# Altium footprint library Connectors.PcbLib: 228 footprints (part 3 of 15)
Each footprint in its own frame and in the unit in brackets; x right, y up, seen from the top. Pads: shape width x height; smd on the part's side, far side on the other; paste and mask are expansions set on the pad; w line width, h text height; cw(c..) or ccw(c..) is an arc to the next point about the centre after c.
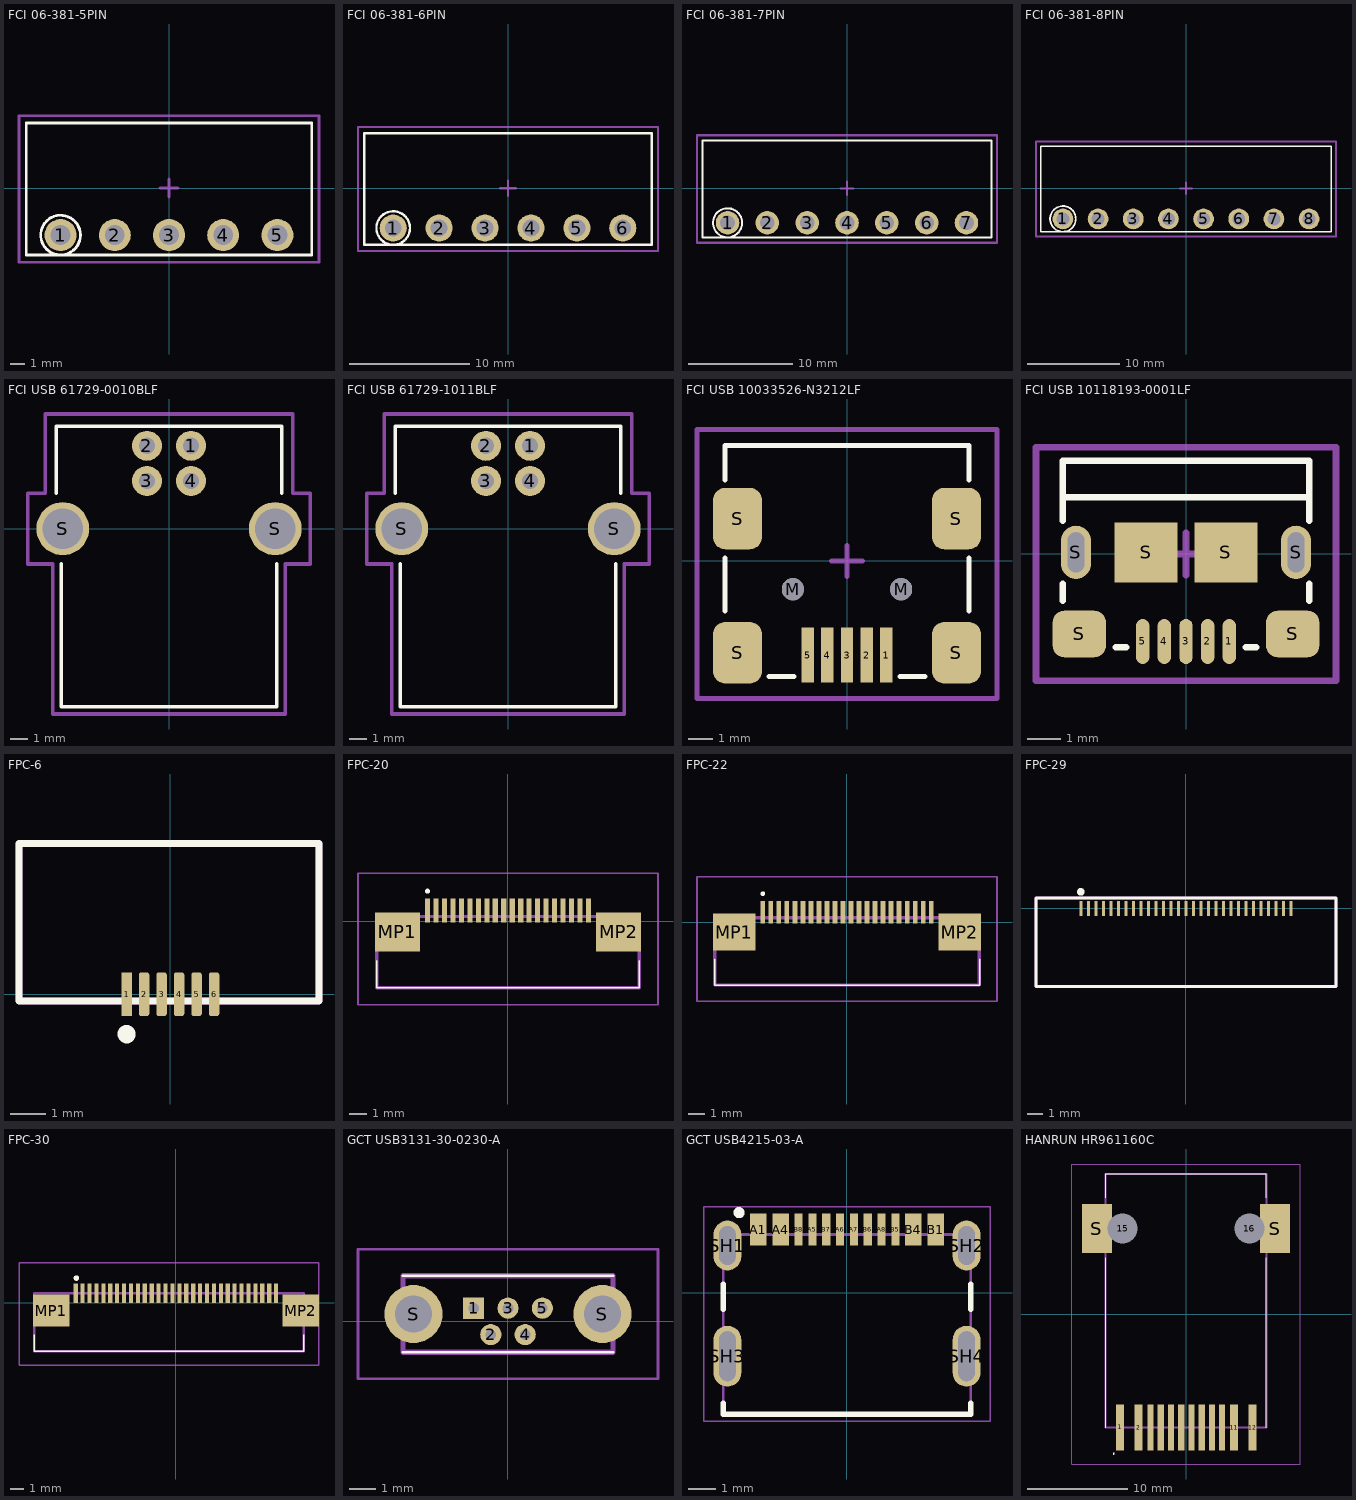
[diagram p2: the footprints below, top view; thin cyan lines are the x and y axes]

## FCI 06-381-5PIN [mm] "FCI Pluggable Terminal Block"
height 7
pads (5):
  round 2.25 hole 1.4: 1(-7.62,-3.302) 2(-3.81,-3.302) 3(0,-3.302) 4(3.81,-3.302) 5(7.62,-3.302)
Top Overlay:
  circle w0.2: c-7.62,-3.302 r1.393
  lines w0.2: -10.033,-4.699 10.033,-4.699 10.033,4.572 -10.033,4.572 -10.033,-4.699
Top Courtyard:
  lines w0.2: -0.635,0 0.635,0 ; 0,-0.635 0,0.635 ; -10.541,-5.207 10.541,-5.207 10.541,5.08 -10.541,5.08 -10.541,-5.207
3D body "FCI 06-381 5Pos.STEP": height 7.6, standoff -3.52, extent -10.12,-4.699 10.12,4.501

## FCI 06-381-6PIN [mm] "FCI Pluggable Terminal Block"
height 7
pads (6):
  round 2.25 hole 1.4: 1(-9.525,-3.302) 2(-5.715,-3.302) 3(-1.905,-3.302) 4(1.905,-3.302) 5(5.715,-3.302) 6(9.525,-3.302)
Top Overlay:
  circle w0.2: c-9.525,-3.302 r1.393
  lines w0.2: -11.938,-4.699 -11.938,4.572 11.938,4.572 11.938,-4.699 -11.938,-4.699
Top Courtyard:
  lines w0.2: -0.635,0 0.635,0 ; 0,-0.635 0,0.635 ; -12.446,-5.207 -12.446,5.08 12.446,5.08 12.446,-5.207 -12.446,-5.207
3D body "FCI 06-381 6Pos.STEP": height 7.6, standoff -3.52, extent -12.025,-4.699 12.025,4.501

## FCI 06-381-7PIN [mm] "FCI Pluggable Terminal Block"
height 7
pads (7):
  round 2.25 hole 1.4: 1(-11.43,-3.302) 2(-7.62,-3.302) 3(-3.81,-3.302) 4(0,-3.302) 5(3.81,-3.302) 6(7.62,-3.302) 7(11.43,-3.302)
Top Overlay:
  circle w0.2: c-11.43,-3.302 r1.393
  lines w0.2: -13.843,-4.699 13.843,-4.699 13.843,4.572 -13.843,4.572 -13.843,-4.699
Top Courtyard:
  lines w0.2: -0.635,0 0.635,0 ; 0,-0.635 0,0.635 ; -14.351,-5.207 14.351,-5.207 14.351,5.08 -14.351,5.08 -14.351,-5.207
3D body "FCI 06-381 7Pos.STEP": height 7.6, standoff -3.52, extent -13.93,-4.699 13.93,4.501

## FCI 06-381-8PIN [mm] "FCI Pluggable Terminal Block"
height 7
pads (8):
  round 2.25 hole 1.4: 1(-13.335,-3.302) 2(-9.525,-3.302) 3(-5.715,-3.302) 4(-1.905,-3.302) 5(1.905,-3.302) 6(5.715,-3.302) 7(9.525,-3.302) 8(13.335,-3.302)
Top Overlay:
  circle w0.2: c-13.335,-3.302 r1.393
  lines w0.2: -15.748,-4.699 -15.748,4.572 15.748,4.572 15.748,-4.699 -15.748,-4.699
Top Courtyard:
  lines w0.2: -0.635,0 0.635,0 ; 0,-0.635 0,0.635 ; -16.256,-5.207 -16.256,5.08 16.256,5.08 16.256,-5.207 -16.256,-5.207
3D body "FCI 06-381 8Pos.STEP": height 7.6, standoff -3.52, extent -15.835,-4.699 15.835,4.501

## FCI USB 61729-0010BLF [mm]
height 11
pads (6):
  round 1.7 hole 0.92: 1(1.25,4.7) 2(-1.25,4.7) 3(-1.25,2.71) 4(1.25,2.71)
  round 3 hole 2.3: S(-6.02,0) S(6.02,0)
Top Overlay:
  lines w0.2: -6.4,2 -6.4,5.8 6.4,5.8 6.4,2 ; -6.1,-2 -6.1,-10.1 6.1,-10.1 6.1,-2
Top Courtyard:
  lines w0.2: -8,-2 -8,2 -7,2 -7,6.5 0,6.5 7,6.5 7,2 8,2 8,-2 6.6,-2 6.6,-10.5 0,-10.5 -6.6,-10.5 -6.6,-2 -8,-2
3D body "FCI 61729-0010BLF.STEP": height 11, standoff -2.8, extent -6.56,-10.175 6.56,5.765

## FCI USB 61729-1011BLF [mm]
height 11
pads (6):
  round 1.7 hole 0.92: 1(1.25,4.7) 2(-1.25,4.7) 3(-1.25,2.71) 4(1.25,2.71)
  round 3 hole 2.3: S(-6.02,0) S(6.02,0)
Top Overlay:
  lines w0.2: -6.4,2 -6.4,5.8 6.4,5.8 6.4,2 ; -6.1,-2 -6.1,-10.1 6.1,-10.1 6.1,-2
Top Courtyard:
  lines w0.2: -8,-2 -6.6,-2 -6.6,-10.5 0,-10.5 6.6,-10.5 6.6,-2 8,-2 8,2 7,2 7,6.5 0,6.5 -7,6.5 -7,2 -8,2 -8,-2
3D body "FCI 61729-1011BLF.STEP": height 11, standoff -2.8, extent -6.56,-10.175 6.56,5.765

## FCI USB 10033526-N3212LF [mm] "USB 2.0 Type B Mini"
height 3.95
pads (11):
  rect 0.5x2.25 smd: 1(1.6,-3.826) 2(0.8,-3.826) 3(0,-3.826) 4(-0.8,-3.826) 5(-1.6,-3.826)
  round 0.9 hole 0.9 unplated: M(-2.2,-1.151) M(2.2,-1.151)
  rrect50% 2x2.5 smd: S(-4.45,-3.731) S(-4.45,1.719) S(4.45,-3.731) S(4.45,1.719)
Top Overlay:
  lines w0.2: -4.953,-2.04 -4.953,0.119 ; -4.953,3.294 -4.953,4.691 4.953,4.691 4.953,3.294 ; -3.175,-4.707 -2.159,-4.707 ; 2.159,-4.707 3.175,-4.707 ; 4.953,-2.04 4.953,0.119
Top Courtyard:
  lines w0.2: -0.635,0 0.635,0 ; 0,-0.635 0,0.635 ; -6.096,-5.588 -6.096,5.334 6.096,5.334 6.096,-5.588 -6.096,-5.588
3D body "FCI USB 10033526-N3212LF.STEP": height 4.01, standoff -0.99, extent -4.95,-4.701 4.95,4.699

## FCI USB 10118193-0001LF [mm] "USB 2.0 Type B Micro"
height 3.1
pads (11):
  oval 0.4x1.35 smd: 1(1.3,-2.625) 2(0.65,-2.625) 3(0,-2.625) 4(-0.65,-2.625) 5(-1.3,-2.625)
  oval 0.9x1.6 hole 0.5 slot 1.2 at 90 deg: S(-3.3,0.05) S(3.3,0.05)
  rrect50% 1.6x1.4 smd: S(-3.2,-2.4) S(3.2,-2.4)
  rect 1.9x1.8 smd: S(-1.2,0.05) S(1.2,0.05)
Top Overlay:
  lines w0.2: -3.7,-1.4 -3.7,-0.9 ; -3.7,1 -3.7,1.7 ; -2.1,-2.8 -1.8,-2.8 ; 1.8,-2.8 2.1,-2.8 ; 3.7,-1.4 3.7,-0.9 ; 3.7,1 3.7,1.7 ; -3.7,1.7 3.7,1.7 ; -3.7,1.7 -3.7,2.8 3.7,2.8 3.7,1.7
Top Courtyard:
  lines w0.2: -0.635,0 0.635,0 ; 0,-0.635 0,0.635 ; -4.5,-3.8 -4.5,3.2 4.5,3.2 4.5,-3.8 -4.5,-3.8
3D body "FCI USB 10118193-0001lfc.STEP": height 2.78, standoff -0.82, extent -3.929,-2.9 3.928,2.76

## FPC-6 [mm] "6 way 0.5 pitch FPC Connector"
height 2
pads (6):
  rect 0.3x1.25 smd: 1(-1.25,0)
  rrect50% 0.3x1.25 smd: 2(-0.75,0) 3(-0.25,0) 4(0.25,0) 5(0.75,0) 6(1.25,0)
Top Overlay:
  circle w0.5: c-1.25,-1.14 r0.01
  lines w0.2: 4.25,-0.19 -4.325,-0.19 -4.325,4.31 4.25,4.31 4.25,-0.175
Top Component Outline:
  lines w0.2: -4.325,-0.19 -4.325,4.31 4.25,4.31 4.25,-0.19 -4.325,-0.19
Top Courtyard:
  lines w0.2: -4.325,-0.19 4.25,-0.19 4.25,4.31 -4.325,4.31 -4.325,-0.19
3D body "FPC-FFC SFV-R Series, 6 Pos, Top Side Contact, Side Entry Surface Mount Connector, 0.5 mm.stp": height 1.82, standoff -0.05, extent -4.275,-0.5 4.225,4.4

## FPC-20 [mm] "SFV20R2STE1HLF"
height 1.8
pads (22):
  rect 0.3x1.4 smd: 1(-4.75,0.625) 2(-4.25,0.625) 3(-3.75,0.625) 4(-3.25,0.625) 5(-2.75,0.625) 6(-2.25,0.625) 7(-1.75,0.625) 8(-1.25,0.625) 9(-0.75,0.625) 10(-0.25,0.625) 11(0.25,0.625) 12(0.75,0.625) 13(1.25,0.625) 14(1.75,0.625) 15(2.25,0.625) 16(2.75,0.625) 17(3.25,0.625) 18(3.75,0.625) 19(4.25,0.625) 20(4.75,0.625)
  rect 2.65x2.3 smd: MP1(-6.525,-0.625) MP2(6.525,-0.625)
Top Overlay:
  lines w0.1: -7.75,-3.925 7.75,-3.925 ; -7.75,-3.925 7.75,-3.925 ; -7.75,-3.925 -7.75,-2.325 -7.75,-3.925 ; 7.75,-3.925 7.75,-2.325 7.75,-3.925
  lines w0.2: -4.8,1.775 ccw(c-4.75,1.775) -4.7,1.775 ; -4.8,1.775 cw(c-4.75,1.775) -4.7,1.775 ; -4.8,1.775 ccw(c-4.75,1.775) -4.7,1.775
Top Component Outline:
  lines w0.2: -7.75,-3.925 -7.75,0.275 7.75,0.275 7.75,-3.925 -7.75,-3.925
Top Courtyard:
  lines w0.1: -8.85,-4.925 -8.85,2.825 8.85,2.825 8.85,-4.925 -8.85,-4.925
3D body "ssfv20r_2stlf.stp": height 1.82, standoff -0.05, extent -7.75,-3.875 7.75,1.025

## FPC-22 [mm] "SFV22R-2STE1HLF"
height 1.8
pads (24):
  rect 0.3x1.4 smd: 1(-5.25,0.625) 2(-4.75,0.625) 3(-4.25,0.625) 4(-3.75,0.625) 5(-3.25,0.625) 6(-2.75,0.625) 7(-2.25,0.625) 8(-1.75,0.625) 9(-1.25,0.625) 10(-0.75,0.625) 11(-0.25,0.625) 12(0.25,0.625) 13(0.75,0.625) 14(1.25,0.625) 15(1.75,0.625) 16(2.25,0.625) 17(2.75,0.625) 18(3.25,0.625) 19(3.75,0.625) 20(4.25,0.625) 21(4.75,0.625) 22(5.25,0.625)
  rect 2.65x2.3 smd: MP1(-7.025,-0.625) MP2(7.025,-0.625)
Top Overlay:
  lines w0.1: 8.275,-2.325 8.275,-3.925 ; -8.25,-3.925 8.275,-3.925 ; -8.25,-3.925 8.275,-3.925 ; -8.25,-3.925 -8.25,-2.325 -8.25,-3.925
  lines w0.2: -5.3,1.775 ccw(c-5.25,1.775) -5.2,1.775 ; -5.3,1.775 cw(c-5.25,1.775) -5.2,1.775 ; -5.3,1.775 ccw(c-5.25,1.775) -5.2,1.775
Top Component Outline:
  lines w0.2: -8.25,-3.925 -8.25,0.275 8.25,0.275 8.25,-3.925 -8.25,-3.925
Top Courtyard:
  lines w0.1: -9.35,-4.925 -9.35,2.825 9.35,2.825 9.35,-4.925 -9.35,-4.925
3D body "SFV22R-2STE1HLF.stp": height 1.82, standoff -0.05, extent -8.25,-3.875 8.25,1.025

## FPC-29 [mm] "29 way 0.5 pitch FPC Connector"
pads (29):
  rect 0.2x1 smd: 1(-7,0) 2(-6.5,0) 3(-6,0) 4(-5.5,0) 5(-5,0) 6(-4.5,0) 7(-4,0) 8(-3.5,0) 9(-3,0) 10(-2.5,0) 11(-2,0) 12(-1.5,0) 13(-1,0) 14(-0.5,0) 15(0,0) 16(0.5,0) 17(1,0) 18(1.5,0) 19(2,0) 20(2.5,0) 21(3,0) 22(3.5,0) 23(4,0) 24(4.5,0) 25(5,0) 26(5.5,0) 27(6,0) 28(6.5,0) 29(7,0)
Top Overlay:
  circle w0.5: c-7.01,1.1 r0.01
  lines w0.2: -10,-5.2 -10,0.7 10,0.7 10,-5.2 -10,-5.2
Top Component Outline:
  lines w0.2: -10,-5.2 -10,0.7 10,0.7 10,-5.2 -10,-5.2
Top Courtyard:
  lines w0.2: -10,-5.2 -10,0.7 10,0.7 10,-5.2 -10,-5.2
3D body "fpc-0.5 pitch-29 pin.stp": height 2.02, standoff -0.02, extent -10,-4.825 10,0.575

## FPC-30 [mm] "30 way 0.5 pitch FPC Connector"
pads (32):
  rect 0.3x1.4 smd: 1(-7.25,0.7) 2(-6.75,0.7) 3(-6.25,0.7) 4(-5.75,0.7) 5(-5.25,0.7) 6(-4.75,0.7) 7(-4.25,0.7) 8(-3.75,0.7) 9(-3.25,0.7) 10(-2.75,0.7) 11(-2.25,0.7) 12(-1.75,0.7) 13(-1.25,0.7) 14(-0.75,0.7) 15(-0.25,0.7) 16(0.25,0.7) 17(0.75,0.7) 18(1.25,0.7) 19(1.75,0.7) 20(2.25,0.7) 21(2.75,0.7) 22(3.25,0.7) 23(3.75,0.7) 24(4.25,0.7) 25(4.75,0.7) 26(5.25,0.7) 27(5.75,0.7) 28(6.25,0.7) 29(6.75,0.7) 30(7.25,0.7)
  rect 2.65x2.3 smd: MP1(-9.025,-0.55) MP2(9.025,-0.55)
Top Overlay:
  lines w0.1: -10.25,-2.3 -10.25,-3.5 9.25,-3.5 9.25,-2.3
  lines w0.2: -7.3,1.8 cw(c-7.2,1.8) -7.1,1.8 cw(c-7.2,1.8) -7.3,1.8
Top Component Outline:
  lines w0.2: -10.25,-3.5 -10.25,0.7 9.25,0.7 9.25,-3.5 -10.25,-3.5
Top Courtyard:
  lines w0.1: -11.35,-4.5 -11.35,2.9 10.35,2.9 10.35,-4.5 -11.35,-4.5
3D body "Amphenol SSFV30R-3STLF.stp": height 1.87, standoff 0, extent -10.25,-3.55 10.25,1.35

## GCT USB3131-30-0230-A [mm]
pads (7):
  rect 0.8x0.8 hole 0.4: 1(-1.3,0.5)
  round 0.8 hole 0.4: 2(-0.65,-0.5) 3(0,0.5) 4(0.65,-0.5) 5(1.3,0.5)
  round 2.2 hole 1.395: S(-3.575,0.28) S(3.575,0.28)
Top Overlay:
  lines w0.1: -3.97,-1.17 3.97,-1.17 ; -3.97,1.73 3.97,1.73
Top Component Outline:
  lines w0.2: -3.97,-1.17 -3.97,1.73 3.97,1.73 3.97,-1.17 -3.97,-1.17
Top Courtyard:
  lines w0.1: -5.675,-2.17 -5.675,2.73 5.675,2.73 5.675,-2.17 -5.675,-2.17
3D body "USB3131-30-0230-A.stp": height 5.61, standoff -2.3, extent -3.971,-1.208 3.971,1.724

## GCT USB4215-03-A [mm]
height 3.16
pads (16):
  rect 0.6x1.15 smd: A1(-3.2,2.288) A4(-2.4,2.288) B1(3.2,2.288) B4(2.4,2.288)
  rect 0.3x1.15 smd: A5(-1.25,2.288) A6(-0.25,2.288) A7(0.25,2.288) A8(1.25,2.288) B5(1.75,2.288) B6(0.75,2.288) B7(-0.75,2.288) B8(-1.75,2.288)
  oval 1x1.8 hole 0.6 slot 1.4 at 90 deg: SH1(-4.32,1.713) SH2(4.32,1.713)
  oval 1x2.2 hole 0.6 slot 1.8 at 90 deg: SH3(-4.32,-2.287) SH4(4.32,-2.287)
Top Overlay:
  circle w0.2: c-3.9,2.9 r0.1
  lines w0.2: -4.47,-3.987 -4.47,-4.387 4.47,-4.387 4.47,-3.987 ; -4.47,-0.587 -4.47,0.313 ; 4.47,-0.587 4.47,0.313
Top Component Outline:
  lines w0.1: -4.47,-4.387 -4.47,2.113 4.47,2.113 4.47,-4.387 -4.47,-4.387
Top Courtyard:
  lines w0.05: -5.17,-4.637 -5.17,3.113 5.17,3.113 5.17,-4.637 -5.17,-4.637
3D body "GCT USB4215-03-A.stp": height 3.24, standoff -0.82, extent -4.47,-4.267 4.47,2.482

## HANRUN HR961160C [mm] "1x1 Port Tab-UP Surface Mount RJ45 Connector"
height 13.61
pads (16):
  rect 0.81x4.6 smd: 1(-6.6,-11.35) 2(-4.75,-11.375) 11(4.825,-11.375) 12(6.675,-11.375)
  rect 0.61x4.6 smd: 3(-3.55,-11.375) 4(-2.525,-11.375) 5(-1.5,-11.375) 6(-0.475,-11.375) 7(0.55,-11.375) 8(1.575,-11.375) 9(2.6,-11.375) 10(3.625,-11.375)
  round 1.5 hole 3: 15(-6.35,8.545) 16(6.35,8.545)
  rect 3x4.9 smd: S(-8.92,8.545) S(8.92,8.545)
Top Overlay:
  lines w0.1: -8.05,-11.375 -8.05,5.625 ; -8.05,11.625 -8.05,14.025 8,14.025 8.05,14.025 8.05,11.625 ; 8.05,-11.375 8.05,5.625 ; -7.3,-13.975 cw(c-7.25,-13.975) -7.2,-13.975 cw(c-7.25,-13.975) -7.3,-13.975
Top Component Outline:
  lines w0.2: -8.05,-11.375 8.05,-11.375 8.05,14.025 -8.05,14.025 -8.05,-11.375
Top Courtyard:
  lines w0.1: -11.42,-15.025 11.42,-15.025 11.42,15.025 -11.42,15.025 -11.42,-15.025
3D body "1X1RJ45_SMT.STEP": height 15.21, standoff -0.86, extent -9.45,-13.075 9.488,13.775